# Altium schematic symbol library ERA-6AEB471V.SchLib: 1 symbol
Pins are listed as number, name and electrical type; pins without a type are passive.

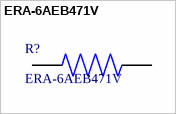
[diagram p0: symbol ERA-6AEB471V]

## ERA-6AEB471V
designator R?
RES SMD 470 OHM 0.1% 1/8W 0805; Manufacturer_Name: Panasonic; Copyright: Copyright (C) 2025 Ultra Librarian. All rights reserved.; Manufacturer_Part_Number: ERA-6AEB471V
footprint RC0805N_PAN
pins: 1, 2